# Altium footprint library Miscellaneous Connectors.PcbLib: 245 footprints (part 6 of 16)
Each footprint in its own frame and in the unit in brackets; x right, y up, seen from the top. Pads: shape width x height; smd on the part's side, far side on the other; paste and mask are expansions set on the pad; w line width, h text height; cw(c..) or ccw(c..) is an arc to the next point about the centre after c.
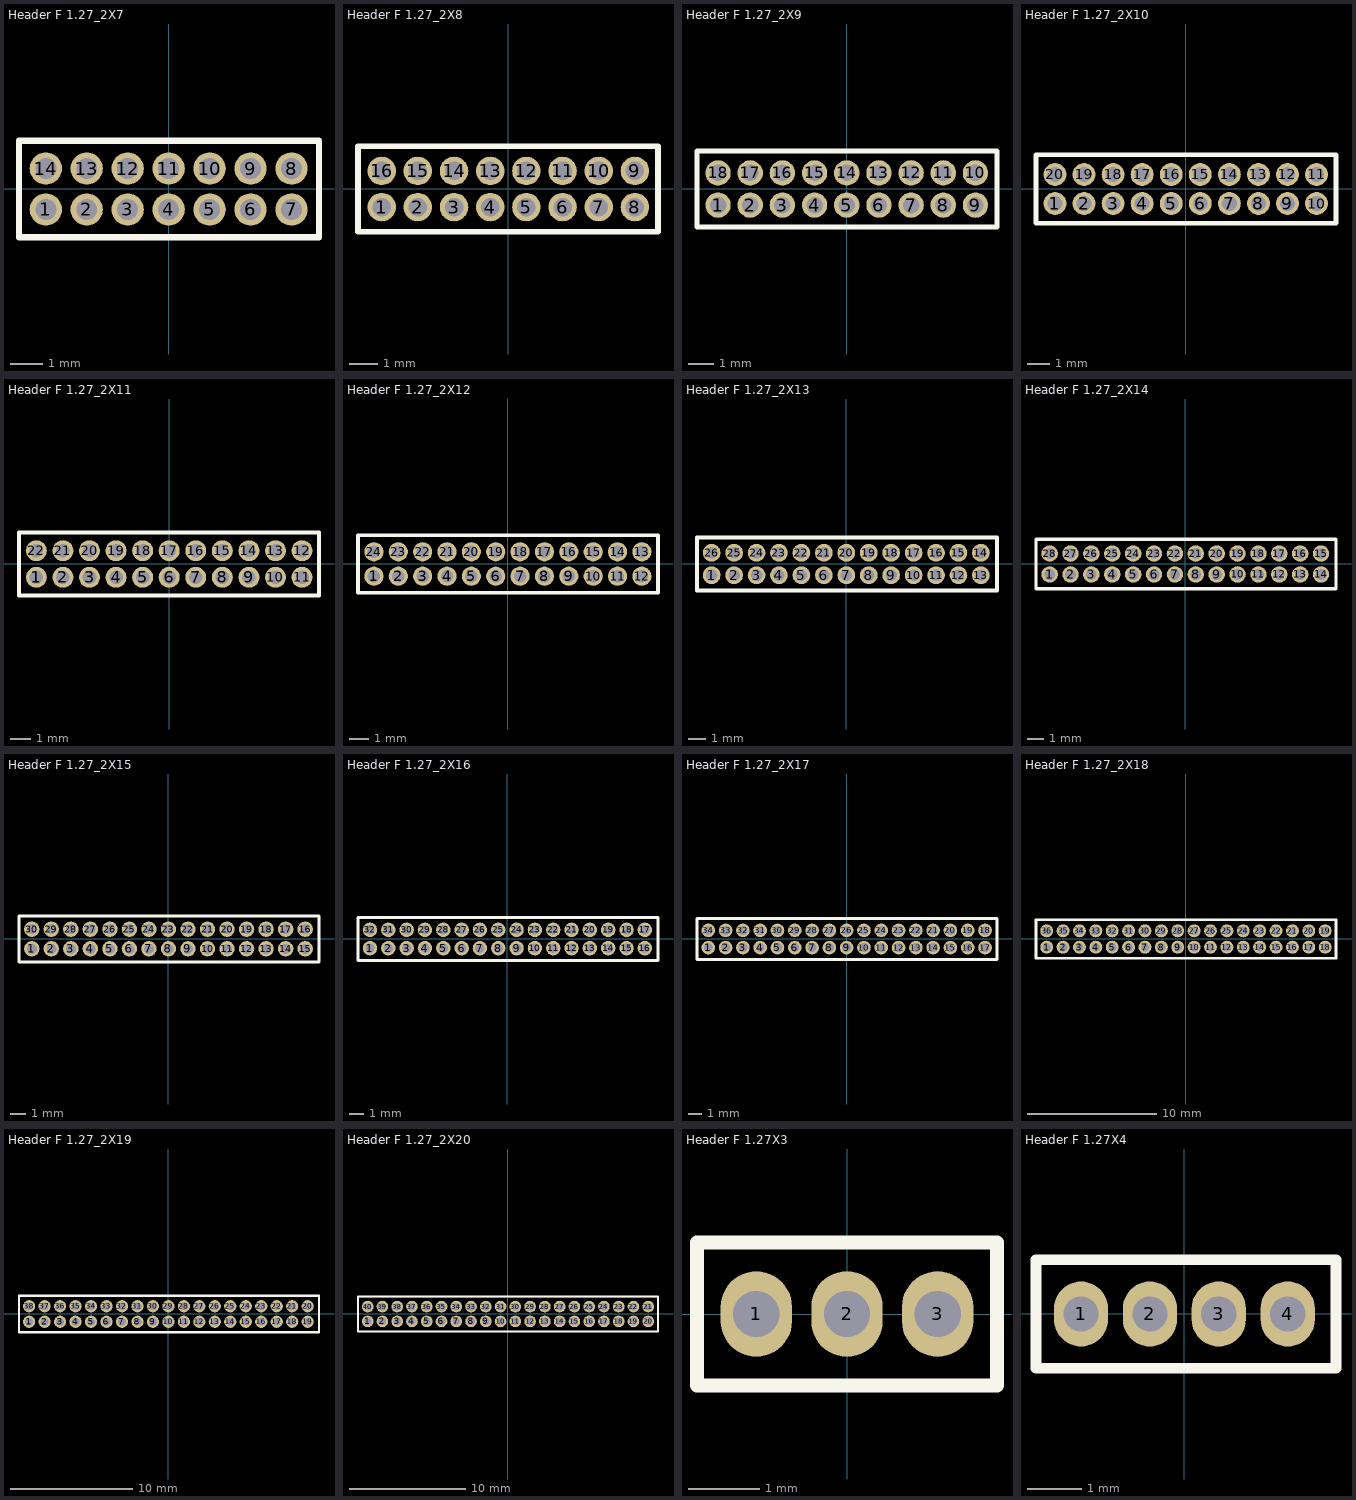
[diagram p5: the footprints below, top view; thin cyan lines are the x and y axes]

## Header F 1.27_2X7 [mm]
pads (14):
  round 1 hole 0.65: 1(-3.81,-0.635) 2(-2.54,-0.635) 3(-1.27,-0.635) 4(0,-0.635) 5(1.27,-0.635) 6(2.54,-0.635) 7(3.81,-0.635) 8(3.81,0.635) 9(2.54,0.635) 10(1.27,0.635) 11(0,0.635) 12(-1.27,0.635) 13(-2.54,0.635) 14(-3.81,0.635)
Top Overlay:
  lines w0.2: -4.64,-1.5 4.66,-1.5 4.66,1.5 -4.64,1.5 -4.64,-1.5
Mechanical 15:
  lines w0.1: -4.64,-1.5 -4.64,1.5 4.66,1.5 4.66,-1.5 -4.64,-1.5
3D body: height 3.4, standoff -2.4, extent -4.645,-1.5 4.645,1.6

## Header F 1.27_2X8 [mm]
pads (16):
  round 1 hole 0.65: 1(-4.445,-0.635) 2(-3.175,-0.635) 3(-1.905,-0.635) 4(-0.635,-0.635) 5(0.635,-0.635) 6(1.905,-0.635) 7(3.175,-0.635) 8(4.445,-0.635) 9(4.445,0.635) 10(3.175,0.635) 11(1.905,0.635) 12(0.635,0.635) 13(-0.635,0.635) 14(-1.905,0.635) 15(-3.175,0.635) 16(-4.445,0.635)
Top Overlay:
  lines w0.2: -5.275,-1.5 -5.275,1.5 5.255,1.5 5.255,-1.5 -5.275,-1.5
Mechanical 15:
  lines w0.1: -5.275,-1.5 5.255,-1.5 5.255,1.5 -5.275,1.5 -5.275,-1.5
3D body: height 3.4, standoff -2.4, extent -5.28,-1.5 5.28,1.6

## Header F 1.27_2X9 [mm]
pads (18):
  round 1 hole 0.65: 1(-5.08,-0.635) 2(-3.81,-0.635) 3(-2.54,-0.635) 4(-1.27,-0.635) 5(0,-0.635) 6(1.27,-0.635) 7(2.54,-0.635) 8(3.81,-0.635) 9(5.08,-0.635) 10(5.08,0.635) 11(3.81,0.635) 12(2.54,0.635) 13(1.27,0.635) 14(0,0.635) 15(-1.27,0.635) 16(-2.54,0.635) 17(-3.81,0.635) 18(-5.08,0.635)
Top Overlay:
  lines w0.2: -5.91,-1.5 5.93,-1.5 5.93,1.5 -5.91,1.5 -5.91,-1.5
Mechanical 15:
  lines w0.1: -5.91,-1.5 -5.91,1.5 5.93,1.5 5.93,-1.5 -5.91,-1.5
3D body: height 3.4, standoff -2.4, extent -5.915,-1.5 5.915,1.6

## Header F 1.27_2X10 [mm]
pads (20):
  round 1 hole 0.65: 1(-5.715,-0.635) 2(-4.445,-0.635) 3(-3.175,-0.635) 4(-1.905,-0.635) 5(-0.635,-0.635) 6(0.635,-0.635) 7(1.905,-0.635) 8(3.175,-0.635) 9(4.445,-0.635) 10(5.715,-0.635) 11(5.715,0.635) 12(4.445,0.635) 13(3.175,0.635) 14(1.905,0.635) 15(0.635,0.635) 16(-0.635,0.635) 17(-1.905,0.635) 18(-3.175,0.635) 19(-4.445,0.635) 20(-5.715,0.635)
Top Overlay:
  lines w0.2: -6.545,-1.5 -6.545,1.5 6.565,1.5 6.565,-1.5 -6.545,-1.5
Mechanical 15:
  lines w0.1: -6.545,-1.5 6.565,-1.5 6.565,1.5 -6.545,1.5 -6.545,-1.5
3D body: height 3.4, standoff -2.4, extent -6.55,-1.5 6.55,1.6

## Header F 1.27_2X11 [mm]
pads (22):
  round 1 hole 0.65: 1(-6.35,-0.635) 2(-5.08,-0.635) 3(-3.81,-0.635) 4(-2.54,-0.635) 5(-1.27,-0.635) 6(0,-0.635) 7(1.27,-0.635) 8(2.54,-0.635) 9(3.81,-0.635) 10(5.08,-0.635) 11(6.35,-0.635) 12(6.35,0.635) 13(5.08,0.635) 14(3.81,0.635) 15(2.54,0.635) 16(1.27,0.635) 17(0,0.635) 18(-1.27,0.635) 19(-2.54,0.635) 20(-3.81,0.635) 21(-5.08,0.635) 22(-6.35,0.635)
Top Overlay:
  lines w0.2: -7.18,-1.5 7.16,-1.5 7.16,1.5 -7.18,1.5 -7.18,-1.5
Mechanical 15:
  lines w0.1: -7.18,-1.5 -7.18,1.5 7.16,1.5 7.16,-1.5 -7.18,-1.5
3D body: height 3.4, standoff -2.4, extent -7.185,-1.5 7.185,1.6

## Header F 1.27_2X12 [mm]
pads (24):
  round 1 hole 0.65: 1(-6.985,-0.635) 2(-5.715,-0.635) 3(-4.445,-0.635) 4(-3.175,-0.635) 5(-1.905,-0.635) 6(-0.635,-0.635) 7(0.635,-0.635) 8(1.905,-0.635) 9(3.175,-0.635) 10(4.445,-0.635) 11(5.715,-0.635) 12(6.985,-0.635) 13(6.985,0.635) 14(5.715,0.635) 15(4.445,0.635) 16(3.175,0.635) 17(1.905,0.635) 18(0.635,0.635) 19(-0.635,0.635) 20(-1.905,0.635) 21(-3.175,0.635) 22(-4.445,0.635) 23(-5.715,0.635) 24(-6.985,0.635)
Top Overlay:
  lines w0.2: -7.815,-1.5 7.825,-1.5 7.825,1.5 -7.815,1.5 -7.815,-1.5
Mechanical 15:
  lines w0.1: -7.815,-1.5 -7.815,1.5 7.825,1.5 7.825,-1.5 -7.815,-1.5
3D body: height 3.4, standoff -2.4, extent -7.82,-1.5 7.82,1.6

## Header F 1.27_2X13 [mm]
pads (26):
  round 1 hole 0.65: 1(-7.62,-0.635) 2(-6.35,-0.635) 3(-5.08,-0.635) 4(-3.81,-0.635) 5(-2.54,-0.635) 6(-1.27,-0.635) 7(0,-0.635) 8(1.27,-0.635) 9(2.54,-0.635) 10(3.81,-0.635) 11(5.08,-0.635) 12(6.35,-0.635) 13(7.62,-0.635) 14(7.62,0.635) 15(6.35,0.635) 16(5.08,0.635) 17(3.81,0.635) 18(2.54,0.635) 19(1.27,0.635) 20(0,0.635) 21(-1.27,0.635) 22(-2.54,0.635) 23(-3.81,0.635) 24(-5.08,0.635) 25(-6.35,0.635) 26(-7.62,0.635)
Top Overlay:
  lines w0.2: -8.45,-1.5 -8.45,1.5 8.53,1.5 8.53,-1.5 -8.45,-1.5
Mechanical 15:
  lines w0.1: -8.45,-1.5 8.53,-1.5 8.53,1.5 -8.45,1.5 -8.45,-1.5
3D body: height 3.4, standoff -2.4, extent -8.455,-1.5 8.455,1.6

## Header F 1.27_2X14 [mm]
pads (28):
  round 1 hole 0.65: 1(-8.255,-0.635) 2(-6.985,-0.635) 3(-5.715,-0.635) 4(-4.445,-0.635) 5(-3.175,-0.635) 6(-1.905,-0.635) 7(-0.635,-0.635) 8(0.635,-0.635) 9(1.905,-0.635) 10(3.175,-0.635) 11(4.445,-0.635) 12(5.715,-0.635) 13(6.985,-0.635) 14(8.255,-0.635) 15(8.255,0.635) 16(6.985,0.635) 17(5.715,0.635) 18(4.445,0.635) 19(3.175,0.635) 20(1.905,0.635) 21(0.635,0.635) 22(-0.635,0.635) 23(-1.905,0.635) 24(-3.175,0.635) 25(-4.445,0.635) 26(-5.715,0.635) 27(-6.985,0.635) 28(-8.255,0.635)
Top Overlay:
  lines w0.2: -9.085,-1.5 -9.085,1.5 9.165,1.5 9.165,-1.5 -9.085,-1.5
Mechanical 15:
  lines w0.1: -9.085,-1.5 9.165,-1.5 9.165,1.5 -9.085,1.5 -9.085,-1.5
3D body: height 3.4, standoff -2.4, extent -9.09,-1.5 9.09,1.6

## Header F 1.27_2X15 [mm]
pads (30):
  round 1 hole 0.65: 1(-8.89,-0.635) 2(-7.62,-0.635) 3(-6.35,-0.635) 4(-5.08,-0.635) 5(-3.81,-0.635) 6(-2.54,-0.635) 7(-1.27,-0.635) 8(0,-0.635) 9(1.27,-0.635) 10(2.54,-0.635) 11(3.81,-0.635) 12(5.08,-0.635) 13(6.35,-0.635) 14(7.62,-0.635) 15(8.89,-0.635) 16(8.89,0.635) 17(7.62,0.635) 18(6.35,0.635) 19(5.08,0.635) 20(3.81,0.635) 21(2.54,0.635) 22(1.27,0.635) 23(0,0.635) 24(-1.27,0.635) 25(-2.54,0.635) 26(-3.81,0.635) 27(-5.08,0.635) 28(-6.35,0.635) 29(-7.62,0.635) 30(-8.89,0.635)
Top Overlay:
  lines w0.2: -9.72,-1.5 -9.72,1.5 9.79,1.5 9.79,-1.5 -9.72,-1.5
Mechanical 15:
  lines w0.1: -9.72,-1.5 9.79,-1.5 9.79,1.5 -9.72,1.5 -9.72,-1.5
3D body: height 3.4, standoff -2.4, extent -9.725,-1.5 9.725,1.6

## Header F 1.27_2X16 [mm]
pads (32):
  round 1 hole 0.65: 1(-9.525,-0.635) 2(-8.255,-0.635) 3(-6.985,-0.635) 4(-5.715,-0.635) 5(-4.445,-0.635) 6(-3.175,-0.635) 7(-1.905,-0.635) 8(-0.635,-0.635) 9(0.635,-0.635) 10(1.905,-0.635) 11(3.175,-0.635) 12(4.445,-0.635) 13(5.715,-0.635) 14(6.985,-0.635) 15(8.255,-0.635) 16(9.525,-0.635) 17(9.525,0.635) 18(8.255,0.635) 19(6.985,0.635) 20(5.715,0.635) 21(4.445,0.635) 22(3.175,0.635) 23(1.905,0.635) 24(0.635,0.635) 25(-0.635,0.635) 26(-1.905,0.635) 27(-3.175,0.635) 28(-4.445,0.635) 29(-5.715,0.635) 30(-6.985,0.635) 31(-8.255,0.635) 32(-9.525,0.635)
Top Overlay:
  lines w0.2: -10.355,-1.5 10.435,-1.5 10.435,1.5 -10.355,1.5 -10.355,-1.5
Mechanical 15:
  lines w0.1: -10.355,-1.5 -10.355,1.5 10.435,1.5 10.435,-1.5 -10.355,-1.5
3D body: height 3.4, standoff -2.4, extent -10.36,-1.5 10.36,1.6

## Header F 1.27_2X17 [mm]
pads (34):
  round 1 hole 0.65: 1(-10.16,-0.635) 2(-8.89,-0.635) 3(-7.62,-0.635) 4(-6.35,-0.635) 5(-5.08,-0.635) 6(-3.81,-0.635) 7(-2.54,-0.635) 8(-1.27,-0.635) 9(0,-0.635) 10(1.27,-0.635) 11(2.54,-0.635) 12(3.81,-0.635) 13(5.08,-0.635) 14(6.35,-0.635) 15(7.62,-0.635) 16(8.89,-0.635) 17(10.16,-0.635) 18(10.16,0.635) 19(8.89,0.635) 20(7.62,0.635) 21(6.35,0.635) 22(5.08,0.635) 23(3.81,0.635) 24(2.54,0.635) 25(1.27,0.635) 26(0,0.635) 27(-1.27,0.635) 28(-2.54,0.635) 29(-3.81,0.635) 30(-5.08,0.635) 31(-6.35,0.635) 32(-7.62,0.635) 33(-8.89,0.635) 34(-10.16,0.635)
Top Overlay:
  lines w0.2: -10.99,-1.5 -10.99,1.5 11.04,1.5 11.04,-1.5 -10.99,-1.5
Mechanical 15:
  lines w0.1: -10.99,-1.5 11.04,-1.5 11.04,1.5 -10.99,1.5 -10.99,-1.5
3D body: height 3.4, standoff -2.4, extent -10.995,-1.5 10.995,1.6

## Header F 1.27_2X18 [mm]
pads (36):
  round 1 hole 0.65: 1(-10.795,-0.635) 2(-9.525,-0.635) 3(-8.255,-0.635) 4(-6.985,-0.635) 5(-5.715,-0.635) 6(-4.445,-0.635) 7(-3.175,-0.635) 8(-1.905,-0.635) 9(-0.635,-0.635) 10(0.635,-0.635) 11(1.905,-0.635) 12(3.175,-0.635) 13(4.445,-0.635) 14(5.715,-0.635) 15(6.985,-0.635) 16(8.255,-0.635) 17(9.525,-0.635) 18(10.795,-0.635) 19(10.795,0.635) 20(9.525,0.635) 21(8.255,0.635) 22(6.985,0.635) 23(5.715,0.635) 24(4.445,0.635) 25(3.175,0.635) 26(1.905,0.635) 27(0.635,0.635) 28(-0.635,0.635) 29(-1.905,0.635) 30(-3.175,0.635) 31(-4.445,0.635) 32(-5.715,0.635) 33(-6.985,0.635) 34(-8.255,0.635) 35(-9.525,0.635) 36(-10.795,0.635)
Top Overlay:
  lines w0.2: -11.625,-1.5 11.635,-1.5 11.635,1.5 -11.625,1.5 -11.625,-1.5
Mechanical 15:
  lines w0.1: -11.625,-1.5 -11.625,1.5 11.635,1.5 11.635,-1.5 -11.625,-1.5
3D body: height 3.4, standoff -2.4, extent -11.63,-1.5 11.63,1.6

## Header F 1.27_2X19 [mm]
pads (38):
  round 1 hole 0.65: 1(-11.43,-0.635) 2(-10.16,-0.635) 3(-8.89,-0.635) 4(-7.62,-0.635) 5(-6.35,-0.635) 6(-5.08,-0.635) 7(-3.81,-0.635) 8(-2.54,-0.635) 9(-1.27,-0.635) 10(0,-0.635) 11(1.27,-0.635) 12(2.54,-0.635) 13(3.81,-0.635) 14(5.08,-0.635) 15(6.35,-0.635) 16(7.62,-0.635) 17(8.89,-0.635) 18(10.16,-0.635) 19(11.43,-0.635) 20(11.43,0.635) 21(10.16,0.635) 22(8.89,0.635) 23(7.62,0.635) 24(6.35,0.635) 25(5.08,0.635) 26(3.81,0.635) 27(2.54,0.635) 28(1.27,0.635) 29(0,0.635) 30(-1.27,0.635) 31(-2.54,0.635) 32(-3.81,0.635) 33(-5.08,0.635) 34(-6.35,0.635) 35(-7.62,0.635) 36(-8.89,0.635) 37(-10.16,0.635) 38(-11.43,0.635)
Top Overlay:
  lines w0.2: -12.26,-1.5 -12.26,1.5 12.36,1.5 12.36,-1.5 -12.26,-1.5
Mechanical 15:
  lines w0.1: -12.26,-1.5 12.36,-1.5 12.36,1.5 -12.26,1.5 -12.26,-1.5
3D body: height 3.4, standoff -2.4, extent -12.265,-1.5 12.265,1.6

## Header F 1.27_2X20 [mm]
pads (40):
  round 1 hole 0.65: 1(-12.065,-0.635) 2(-10.795,-0.635) 3(-9.525,-0.635) 4(-8.255,-0.635) 5(-6.985,-0.635) 6(-5.715,-0.635) 7(-4.445,-0.635) 8(-3.175,-0.635) 9(-1.905,-0.635) 10(-0.635,-0.635) 11(0.635,-0.635) 12(1.905,-0.635) 13(3.175,-0.635) 14(4.445,-0.635) 15(5.715,-0.635) 16(6.985,-0.635) 17(8.255,-0.635) 18(9.525,-0.635) 19(10.795,-0.635) 20(12.065,-0.635) 21(12.065,0.635) 22(10.795,0.635) 23(9.525,0.635) 24(8.255,0.635) 25(6.985,0.635) 26(5.715,0.635) 27(4.445,0.635) 28(3.175,0.635) 29(1.905,0.635) 30(0.635,0.635) 31(-0.635,0.635) 32(-1.905,0.635) 33(-3.175,0.635) 34(-4.445,0.635) 35(-5.715,0.635) 36(-6.985,0.635) 37(-8.255,0.635) 38(-9.525,0.635) 39(-10.795,0.635) 40(-12.065,0.635)
Top Overlay:
  lines w0.2: -12.895,-1.5 12.905,-1.5 12.905,1.5 -12.895,1.5 -12.895,-1.5
Mechanical 15:
  lines w0.1: -12.895,-1.5 -12.895,1.5 12.905,1.5 12.905,-1.5 -12.895,-1.5
3D body: height 3.4, standoff -2.4, extent -12.9,-1.5 12.9,1.6

## Header F 1.27X3 [mm]
pads (3):
  oval 1x1.2 hole 0.65: 1(-1.27,0) 2(0,0) 3(1.27,0)
Top Overlay:
  lines w0.2: -2.1,-1 -2.1,1 2.1,1 2.1,-1 -2.1,-1
Mechanical 15:
  lines w0.1: -2.1,-1 2.1,-1 2.1,1 -2.1,1 -2.1,-1
3D body: height 3.4, standoff -2.4, extent -2.105,-0.9 2.105,0.9

## Header F 1.27X4 [mm]
pads (4):
  oval 1x1.2 hole 0.65: 1(-1.905,0) 2(-0.635,0) 3(0.635,0) 4(1.905,0)
Top Overlay:
  lines w0.2: -2.735,-1 2.795,-1 2.795,1 -2.735,1 -2.735,-1
Mechanical 15:
  lines w0.1: -2.735,-1 -2.735,1 2.795,1 2.795,-1 -2.735,-1
3D body: height 3.4, standoff -2.4, extent -2.74,-0.9 2.74,0.9